# Altium schematic symbol library PIC16F15213-I_SN.SchLib: 1 symbol
Pins are listed as number, name and electrical type; pins without a type are passive.

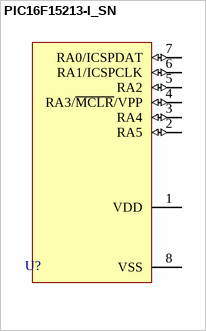
[diagram p0: symbol PIC16F15213-I_SN]

## PIC16F15213-I_SN
designator U?
pins: 1 VDD (power), 2 RA5 (io), 3 RA4 (io), 4 RA3/~{MCLR}/VPP (io), 5 RA2 (io), 6 RA1/ICSPCLK (io), 7 RA0/ICSPDAT (io), 8 VSS (power)